# Altium footprint library FootPrintLib_9.PcbLib: 287 footprints (part 2 of 18)
Each footprint in its own frame and in the unit in brackets; x right, y up, seen from the top. Pads: shape width x height; smd on the part's side, far side on the other; paste and mask are expansions set on the pad; w line width, h text height; cw(c..) or ccw(c..) is an arc to the next point about the centre after c.
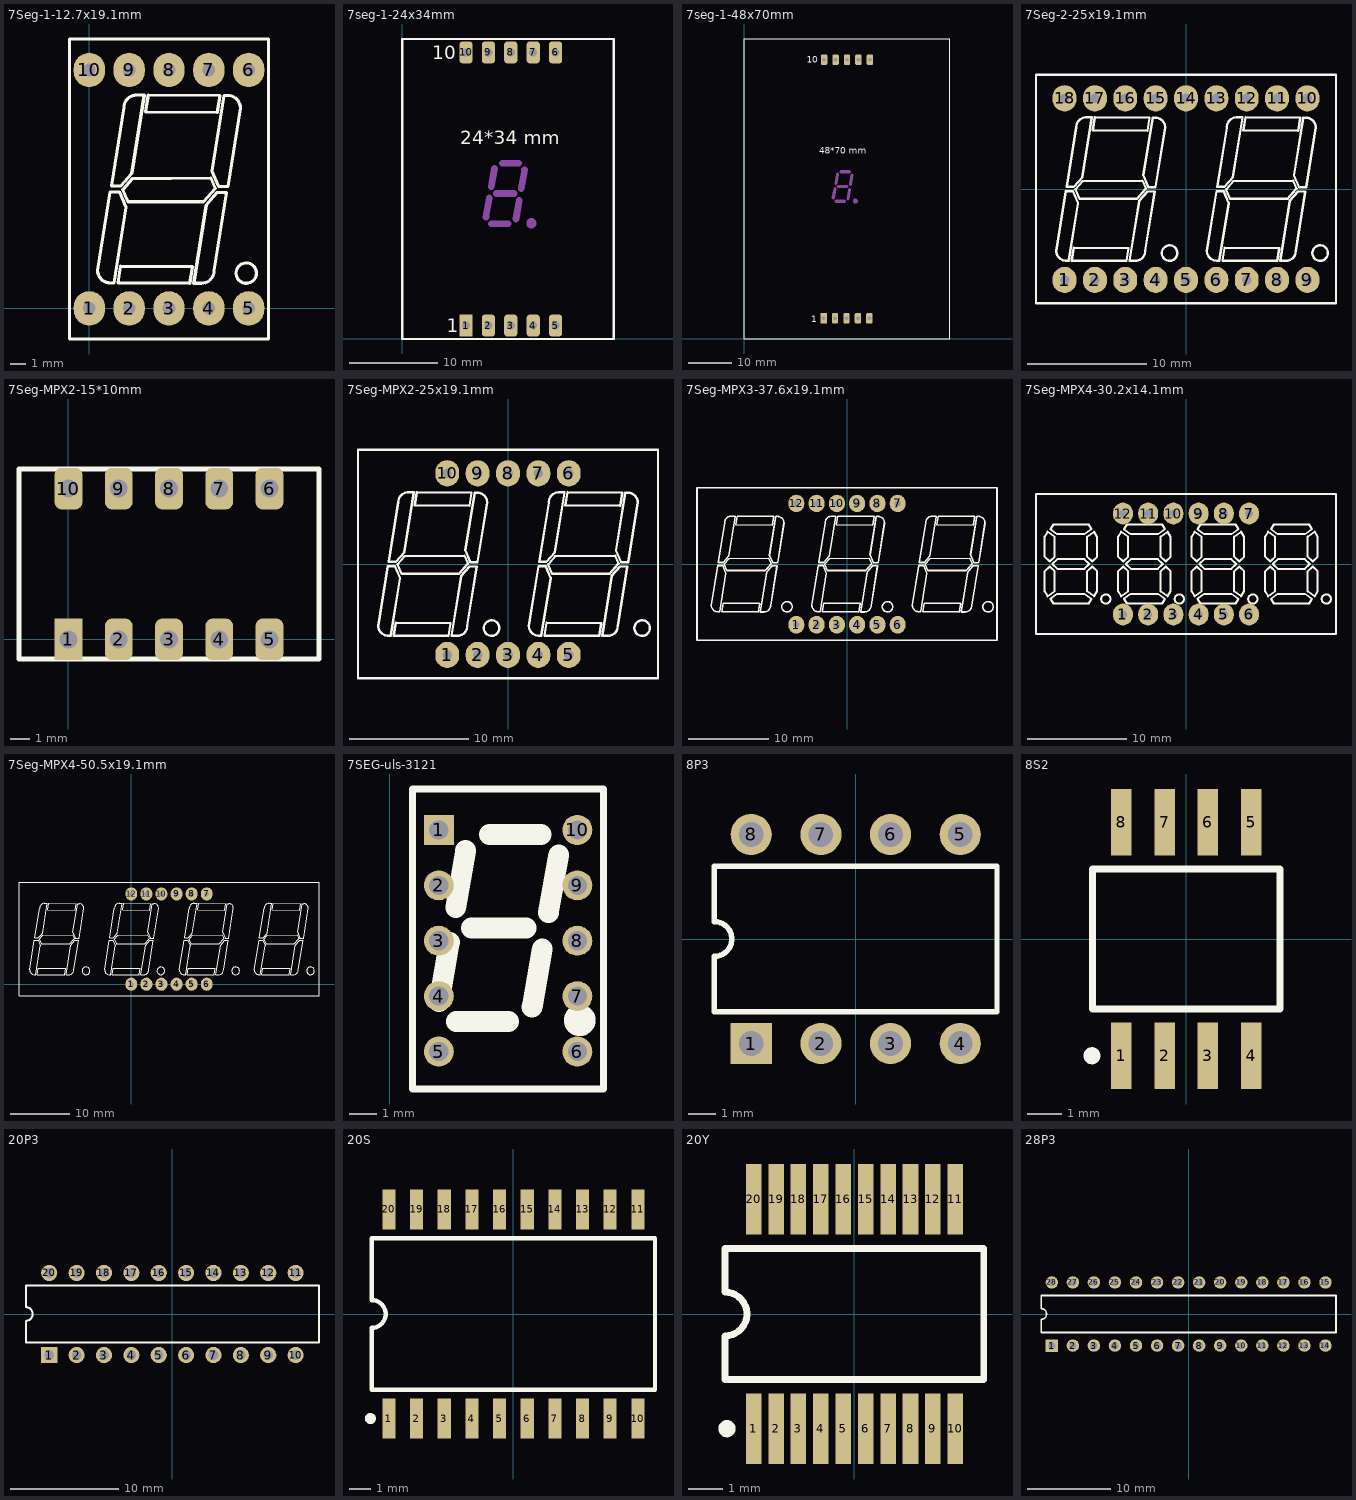
[diagram p1: the footprints below, top view; thin cyan lines are the x and y axes]

## 7Seg-1-12.7x19.1mm [mm] "7Seg Display; 10 Leads; Body 12/7x19/1mm"
height 8.3
pads (10):
  oval 2x2.2 hole 0.8: 1(0,0) 2(2.54,0) 3(5.08,0) 4(7.62,0) 5(10.16,0) 6(10.16,15.2) 7(7.62,15.2) 8(5.08,15.2) 9(2.54,15.2) 10(0,15.2)
Top Overlay:
  circle w0.2: c10.005,2.25 r0.65
  lines w0.2: -1.27,-1.95 11.43,-1.95 11.43,17.175 -1.27,17.175 -1.27,-1.95 ; 0.53,2.425 ccw(c1.33,2.425) 1.33,1.625 1.574,1.625 2.346,6.451 1.93,7.425 1.33,7.425 0.53,2.425 ; 1.405,7.8 2.005,7.8 2.705,8.6 3.505,13.6 3.005,13.6 ccw(c3.005,12.8) 2.205,12.8 1.405,7.8 ; 1.83,1.625 1.998,2.69 6.573,2.665 6.405,1.6 1.83,1.625 ; 2.13,7.575 2.155,7.6 2.732,8.266 7.741,8.317 8.03,7.65 7.28,6.8 2.465,6.8 2.13,7.575 ; 3.584,12.516 8.159,12.491 8.33,13.575 3.755,13.6 3.584,12.516 ; 6.655,1.6 7.155,1.6 ccw(c7.155,2.4) 7.955,2.4 8.755,7.4 8.155,7.4 7.455,6.6 6.655,1.6 ; 7.814,8.749 8.23,7.775 8.83,7.775 9.63,12.775 ccw(c8.83,12.775) 8.83,13.575 8.586,13.575 7.814,8.749
Mechanical 1:
  region: 8.95,13.3
  region: 8.95,-1.9
3D body "end-el-san Co Ltd-King Bright SA-SC56-11.STEP": height 8.1, standoff -3.9, extent -1.27,-1.95 11.43,17.1

## 7seg-1-24x34mm [mm] "7Seg Display; 10 Leads; Body 24x34mm"
height 34
pads (10):
  rect 1.5x2.5 hole 0.9: 1(7.239,1.524)
  rrect50% 1.5x2.5 hole 0.9: 2(9.779,1.524) 3(12.319,1.524) 4(14.859,1.524) 5(17.399,1.524) 6(17.399,32.512) 7(14.859,32.512) 8(12.319,32.512) 9(9.779,32.512) 10(7.239,32.512)
Top Overlay:
  lines w0.254: 0,34 0,0 24,0 ; 0,34.036 24.003,34.036 24.003,0
  text "1" at 5.08,0.762 h1.52
  text "10" at 3.429,31.75 h1.52
  text "24*34 mm" at 6.604,22.098 h1.52
Mechanical 1:
  circle w0.86: c14.654,13.13 r0.15
  lines w0.762: 9.494,13.82 9.874,15.99 ; 10.104,17.27 10.464,19.35 ; 10.124,13.08 12.044,13.08 ; 10.68,16.51 12.688,16.51 ; 11.344,19.94 13.234,19.94 ; 12.904,13.62 13.274,15.75 ; 13.504,17.07 13.884,19.2

## 7seg-1-48x70mm [mm] "7Seg Display; 10 Leads; Body 48x70mm"
height 70
pads (10):
  rect 1.5x2.5 hole 0.9: 1(18.542,4.826)
  rrect50% 1.5x2.5 hole 0.9: 2(21.209,4.826) 3(23.876,4.826) 4(26.543,4.826) 5(29.21,4.826) 6(29.337,65.151) 7(26.67,65.151) 8(24.003,65.151) 9(21.336,65.151) 10(18.669,65.151)
Top Overlay:
  lines w0.254: 0,0 0,69.977 48,69.977 48,0 0,0
  text "10" at 14.605,64.389 h1.52
  text "48*70 mm" at 17.526,43.18 h1.52
  text "1" at 15.621,3.937 h1.52
Mechanical 1:
  circle w0.86: c25.957,32.18 r0.15
  lines w0.762: 20.797,32.87 21.177,35.04 ; 21.407,36.32 21.767,38.4 ; 21.427,32.13 23.347,32.13 ; 21.983,35.56 23.991,35.56 ; 22.647,38.99 24.537,38.99 ; 24.207,32.67 24.577,34.8 ; 24.807,36.12 25.187,38.25

## 7Seg-2-25x19.1mm [mm] "7Seg Display, 18-Leads, Body 25x19/1mm"
height 8.3
pads (18):
  oval 2x2.2 hole 0.8: 1(-10.16,-7.6) 2(-7.62,-7.6) 3(-5.08,-7.6) 4(-2.54,-7.6) 5(0,-7.6) 6(2.54,-7.6) 7(5.08,-7.6) 8(7.62,-7.6) 9(10.16,-7.6) 10(10.16,7.6) 11(7.62,7.6) 12(5.08,7.6) 13(2.54,7.6) 14(0,7.6) 15(-2.54,7.6) 16(-5.08,7.6) 17(-7.62,7.6) 18(-10.16,7.6)
Top Overlay:
  circle w0.2: c-1.375,-5.35 r0.65
  circle w0.2: c11.225,-5.35 r0.65
  lines w0.2: -0.05,-9.55 12.55,-9.55 12.55,9.575 -0.05,9.575 ; 0.05,-9.55 -12.55,-9.55 -12.55,9.575 0.05,9.575 ; -10.85,-5.175 ccw(c-10.05,-5.175) -10.05,-5.975 -9.806,-5.975 -9.034,-1.149 -9.45,-0.175 -10.05,-0.175 -10.85,-5.175 ; -9.975,0.2 -9.375,0.2 -8.675,1 -7.875,6 -8.375,6 ccw(c-8.375,5.2) -9.175,5.2 -9.975,0.2 ; -9.55,-5.975 -9.382,-4.91 -4.807,-4.935 -4.975,-6 -9.55,-5.975 ; -9.25,-0.025 -9.225,0 -8.648,0.666 -3.639,0.717 -3.35,0.05 -4.1,-0.8 -8.915,-0.8 -9.25,-0.025 ; -7.796,4.916 -3.221,4.891 -3.05,5.975 -7.625,6 -7.796,4.916 ; -4.725,-6 -4.225,-6 ccw(c-4.225,-5.2) -3.425,-5.2 -2.625,-0.2 -3.225,-0.2 -3.925,-1 -4.725,-6 ; -3.566,1.149 -3.15,0.175 -2.55,0.175 -1.75,5.175 ccw(c-2.55,5.175) -2.55,5.975 -2.794,5.975 -3.566,1.149 ; 1.75,-5.175 ccw(c2.55,-5.175) 2.55,-5.975 2.794,-5.975 3.566,-1.149 3.15,-0.175 2.55,-0.175 1.75,-5.175 ; 2.625,0.2 3.225,0.2 3.925,1 4.725,6 4.225,6 ccw(c4.225,5.2) 3.425,5.2 2.625,0.2 ; 3.05,-5.975 3.218,-4.91 7.793,-4.935 7.625,-6 3.05,-5.975 ; 3.35,-0.025 3.375,0 3.952,0.666 8.961,0.717 9.25,0.05 8.5,-0.8 3.685,-0.8 3.35,-0.025 ; 4.804,4.916 9.379,4.891 9.55,5.975 4.975,6 4.804,4.916 ; 7.875,-6 8.375,-6 ccw(c8.375,-5.2) 9.175,-5.2 9.975,-0.2 9.375,-0.2 8.675,-1 7.875,-6 ; 9.034,1.149 9.45,0.175 10.05,0.175 10.85,5.175 ccw(c10.05,5.175) 10.05,5.975 9.806,5.975 9.034,1.149
Mechanical 1:
  region: -2.43,5.7
  region: 10.17,5.7
  region: 2.6,-9.5
3D body "end-el-san Co Ltd-King Bright DX56-11A.STEP": height 8.2, standoff -3.8, extent -12.5,-9.525 12.5,9.525

## 7Seg-MPX2-15*10mm [mm] "2 digit 7segment multiplexing"
height 6
pads (10):
  rect 1.4x2.1 hole 0.9: 1(0,0)
  rrect50% 1.4x2.1 hole 0.9: 2(2.54,0) 3(5.08,0) 4(7.62,0) 5(10.16,0) 6(10.16,7.62) 7(7.62,7.62) 8(5.08,7.62) 9(2.54,7.62) 10(0,7.62)
Top Overlay:
  lines w0.254: -2.5,-1 12.66,-1 12.66,8.6 -2.5,8.6 -2.5,-1

## 7Seg-MPX2-25x19.1mm [mm] "7Seg Display, 10-Leads, Body 25x19/1mm"
height 8.3
pads (10):
  oval 2x2.2 hole 0.8: 1(-5.08,-7.6) 2(-2.54,-7.6) 3(0,-7.6) 4(2.54,-7.6) 5(5.08,-7.6) 6(5.08,7.6) 7(2.54,7.6) 8(0,7.6) 9(-2.54,7.6) 10(-5.08,7.6)
Top Overlay:
  circle w0.2: c-1.375,-5.35 r0.65
  circle w0.2: c11.225,-5.35 r0.65
  lines w0.2: -0.05,-9.55 12.55,-9.55 12.55,9.575 -0.05,9.575 ; 0.05,-9.55 -12.55,-9.55 -12.55,9.575 0.05,9.575 ; -10.85,-5.175 ccw(c-10.05,-5.175) -10.05,-5.975 -9.806,-5.975 -9.034,-1.149 -9.45,-0.175 -10.05,-0.175 -10.85,-5.175 ; -9.975,0.2 -9.375,0.2 -8.675,1 -7.875,6 -8.375,6 ccw(c-8.375,5.2) -9.175,5.2 -9.975,0.2 ; -9.55,-5.975 -9.382,-4.91 -4.807,-4.935 -4.975,-6 -9.55,-5.975 ; -9.25,-0.025 -9.225,0 -8.648,0.666 -3.639,0.717 -3.35,0.05 -4.1,-0.8 -8.915,-0.8 -9.25,-0.025 ; -7.796,4.916 -3.221,4.891 -3.05,5.975 -7.625,6 -7.796,4.916 ; -4.725,-6 -4.225,-6 ccw(c-4.225,-5.2) -3.425,-5.2 -2.625,-0.2 -3.225,-0.2 -3.925,-1 -4.725,-6 ; -3.566,1.149 -3.15,0.175 -2.55,0.175 -1.75,5.175 ccw(c-2.55,5.175) -2.55,5.975 -2.794,5.975 -3.566,1.149 ; 1.75,-5.175 ccw(c2.55,-5.175) 2.55,-5.975 2.794,-5.975 3.566,-1.149 3.15,-0.175 2.55,-0.175 1.75,-5.175 ; 2.625,0.2 3.225,0.2 3.925,1 4.725,6 4.225,6 ccw(c4.225,5.2) 3.425,5.2 2.625,0.2 ; 3.05,-5.975 3.218,-4.91 7.793,-4.935 7.625,-6 3.05,-5.975 ; 3.35,-0.025 3.375,0 3.952,0.666 8.961,0.717 9.25,0.05 8.5,-0.8 3.685,-0.8 3.35,-0.025 ; 4.804,4.916 9.379,4.891 9.55,5.975 4.975,6 4.804,4.916 ; 7.875,-6 8.375,-6 ccw(c8.375,-5.2) 9.175,-5.2 9.975,-0.2 9.375,-0.2 8.675,-1 7.875,-6 ; 9.034,1.149 9.45,0.175 10.05,0.175 10.85,5.175 ccw(c10.05,5.175) 10.05,5.975 9.806,5.975 9.034,1.149
Mechanical 1:
  region: -2.43,5.7
  region: 10.17,5.7
  region: 2.6,-9.5
3D body "2 Digit Mux.step": height 8.3, standoff -2.2, extent -12.55,-9.55 12.55,9.55

## 7Seg-MPX3-37.6x19.1mm [mm] "Display, 12-Leads, Body 37/6x19/1mm"
height 8.3
pads (12):
  oval 2x2.2 hole 0.8: 1(-6.35,-7.6) 2(-3.81,-7.6) 3(-1.27,-7.6) 4(1.27,-7.6) 5(3.81,-7.6) 6(6.35,-7.6) 7(6.35,7.6) 8(3.81,7.6) 9(1.27,7.6) 10(-1.27,7.6) 11(-3.81,7.6) 12(-6.35,7.6)
Top Overlay:
  circle w0.2: c-7.525,-5.35 r0.65
  circle w0.2: c5.075,-5.35 r0.65
  circle w0.2: c17.675,-5.35 r0.65
  lines w0.2: -6.2,-9.55 6.5,-9.55 ; -6.2,9.575 6.5,9.575 ; -6.1,-9.55 -18.8,-9.55 -18.8,9.575 -6.1,9.575 ; 6.4,-9.55 18.8,-9.55 18.8,9.575 6.4,9.575 ; -17,-5.175 ccw(c-16.2,-5.175) -16.2,-5.975 -15.956,-5.975 -15.184,-1.149 -15.6,-0.175 -16.2,-0.175 -17,-5.175 ; -16.125,0.2 -15.325,5.2 cw(c-14.525,5.2) -14.525,6 -14.025,6 -14.825,1 -15.525,0.2 -16.125,0.2 ; -15.7,-5.975 -11.125,-6 -10.957,-4.935 -15.532,-4.91 -15.7,-5.975 ; -15.4,-0.025 -15.065,-0.8 -10.25,-0.8 -9.5,0.05 -9.789,0.717 -14.798,0.666 -15.375,0 -15.4,-0.025 ; -13.946,4.916 -13.775,6 -9.2,5.975 -9.371,4.891 -13.946,4.916 ; -10.875,-6 -10.075,-1 -9.375,-0.2 -8.775,-0.2 -9.575,-5.2 cw(c-10.375,-5.2) -10.375,-6 -10.875,-6 ; -9.716,1.149 -8.944,5.975 -8.7,5.975 cw(c-8.7,5.175) -7.9,5.175 -8.7,0.175 -9.3,0.175 -9.716,1.149 ; -4.4,-5.175 ccw(c-3.6,-5.175) -3.6,-5.975 -3.356,-5.975 -2.584,-1.149 -3,-0.175 -3.6,-0.175 -4.4,-5.175 ; -3.525,0.2 -2.925,0.2 -2.225,1 -1.425,6 -1.925,6 ccw(c-1.925,5.2) -2.725,5.2 -3.525,0.2 ; -3.1,-5.975 -2.932,-4.91 1.643,-4.935 1.475,-6 -3.1,-5.975 ; -2.8,-0.025 -2.775,0 -2.198,0.666 2.811,0.717 3.1,0.05 2.35,-0.8 -2.465,-0.8 -2.8,-0.025 ; -1.346,4.916 3.229,4.891 3.4,5.975 -1.175,6 -1.346,4.916 ; 1.725,-6 2.225,-6 ccw(c2.225,-5.2) 3.025,-5.2 3.825,-0.2 3.225,-0.2 2.525,-1 1.725,-6 ; 2.884,1.149 3.3,0.175 3.9,0.175 4.7,5.175 ccw(c3.9,5.175) 3.9,5.975 3.656,5.975 2.884,1.149 ; 8.2,-5.175 ccw(c9,-5.175) 9,-5.975 9.244,-5.975 10.016,-1.149 9.6,-0.175 9,-0.175 8.2,-5.175 ; 9.075,0.2 9.675,0.2 10.375,1 11.175,6 10.675,6 ccw(c10.675,5.2) 9.875,5.2 9.075,0.2 ; 9.5,-5.975 9.668,-4.91 14.243,-4.935 14.075,-6 9.5,-5.975 ; 9.8,-0.025 9.825,0 10.402,0.666 15.411,0.717 15.7,0.05 14.95,-0.8 10.135,-0.8 9.8,-0.025 ; 11.254,4.916 15.829,4.891 16,5.975 11.425,6 11.254,4.916 ; 14.325,-6 14.825,-6 ccw(c14.825,-5.2) 15.625,-5.2 16.425,-0.2 15.825,-0.2 15.125,-1 14.325,-6 ; 15.484,1.149 15.9,0.175 16.5,0.175 17.3,5.175 ccw(c16.5,5.175) 16.5,5.975 16.256,5.975 15.484,1.149
3D body "end-el-san Co Ltd-King Bright BX56-12A.STEP": height 8.2, standoff -3.9, extent -18.8,-9.5 18.8,9.5

## 7Seg-MPX4-30.2x14.1mm [mm] "Display, 12-Leads, Body 30/2x14/1mm"
height 7.3
pads (12):
  oval 2x2.2 hole 0.8: 1(-6.35,-5.08) 2(-3.81,-5.08) 3(-1.27,-5.08) 4(1.27,-5.08) 5(3.81,-5.08) 6(6.35,-5.08) 7(6.35,5.08) 8(3.81,5.08) 9(1.27,5.08) 10(-1.27,5.08) 11(-3.81,5.08) 12(-6.35,5.08)
Top Overlay:
  drawing of 176 lines, arcs and shapes, not listed
Mechanical 1:
  region: 2.6,-6.98
3D body "User Library-3641_w_o_color_jam.STEP": height 7.1, standoff -5.5, extent -15,-7 15,7

## 7Seg-MPX4-50.5x19.1mm [mm] "Display, 12-Leads, Body 50.5x19/1mm"
height 8.3
pads (12):
  oval 2x2.2 hole 0.8: 1(0,0) 2(2.54,0) 3(5.08,0) 4(7.62,0) 5(10.16,0) 6(12.7,0) 7(12.7,15.2) 8(10.16,15.2) 9(7.62,15.2) 10(5.08,15.2) 11(2.54,15.2) 12(0,15.2)
Top Overlay:
  drawing of 170 lines, arcs and shapes, not listed
3D body "User Library-C-564 (7 segment 4 digit LED display).STEP": height 8, standoff -6.2, extent -18.85,-1.9 31.55,17.1

## 7SEG-uls-3121 [mm]
pads (10):
  rect 1.1x1.1 hole 0.7: 1(1.8,10.9)
  round 1.1 hole 0.7: 2(1.8,8.868) 3(1.8,6.836) 4(1.8,4.804) 5(1.8,2.772) 6(6.88,2.772) 7(6.88,4.804) 8(6.88,6.836) 9(6.88,8.868) 10(6.88,10.9)
Top Overlay:
  circle w0.86: c6.97,3.92 r0.15
  lines w0.254: 0.838,1.4 7.838,1.4 7.838,12.4 0.838,12.4 0.838,1.4
  lines w0.762: 1.81,4.61 2.19,6.78 ; 2.42,8.06 2.78,10.14 ; 2.44,3.87 4.36,3.87 ; 2.996,7.3 5.004,7.3 ; 3.66,10.73 5.55,10.73 ; 5.22,4.41 5.59,6.54 ; 5.82,7.86 6.2,9.99

## 8P3 [mm] "DIP; 8 Leads; Row Spacing 7.62 mm; Pitch 2.54 mm"
height 5.33
pads (8):
  rect 1.5x1.5 hole 0.9: 1(-3.81,-3.81)
  round 1.5 hole 0.9: 2(-1.27,-3.81) 3(1.27,-3.81) 4(3.81,-3.81) 5(3.81,3.81) 6(1.27,3.81) 7(-1.27,3.81) 8(-3.81,3.81)
Top Overlay:
  lines w0.2: -5.15,-2.65 5.15,-2.65 5.15,2.65 -5.15,2.65 -5.15,0.635 cw(c-5.15,0) -5.15,-0.635 -5.15,-2.65

## 8S2 [mm] "Small Outline; 8 Leads; Body Width 5.3 mm; Pitch 1.27 mm"
height 2.03
pads (8):
  rect 0.6x1.95 smd: 1(-1.905,-3.425) 2(-0.635,-3.425) 3(0.635,-3.425) 4(1.905,-3.425) 5(1.905,3.425) 6(0.635,3.425) 7(-0.635,3.425) 8(-1.905,3.425)
Top Overlay:
  circle w0.25: c-2.765,-3.425 r0.125
  lines w0.2: -2.75,-2.05 -2.75,-0.683 -2.75,2.05 2.75,2.05 2.75,-2.05 -2.75,-2.05

## 20P3 [mm] "DIP; 20 Leads; Row Spacing 7.62 mm; Pitch 2.54 mm"
height 5.33
pads (20):
  rect 1.5x1.5 hole 0.9: 1(-11.43,-3.81)
  round 1.5 hole 0.9: 2(-8.89,-3.81) 3(-6.35,-3.81) 4(-3.81,-3.81) 5(-1.27,-3.81) 6(1.27,-3.81) 7(3.81,-3.81) 8(6.35,-3.81) 9(8.89,-3.81) 10(11.43,-3.81) 11(11.43,3.81) 12(8.89,3.81) 13(6.35,3.81) 14(3.81,3.81) 15(1.27,3.81) 16(-1.27,3.81) 17(-3.81,3.81) 18(-6.35,3.81) 19(-8.89,3.81) 20(-11.43,3.81)
Top Overlay:
  lines w0.2: -13.6,-2.65 13.6,-2.65 13.6,2.65 -13.6,2.65 -13.6,0.635 cw(c-13.6,0) -13.6,-0.635 -13.6,-2.65

## 20S [mm] "Small Outline; 20 Leads; Body Width 7.5 mm; Pitch 1.27 mm"
height 2.67
pads (20):
  rect 0.6x1.85 smd: 1(-5.715,-4.8) 2(-4.445,-4.8) 3(-3.175,-4.8) 4(-1.905,-4.8) 5(-0.635,-4.8) 6(0.635,-4.8) 7(1.905,-4.8) 8(3.175,-4.8) 9(4.445,-4.8) 10(5.715,-4.8) 11(5.715,4.8) 12(4.445,4.8) 13(3.175,4.8) 14(1.905,4.8) 15(0.635,4.8) 16(-0.635,4.8) 17(-1.905,4.8) 18(-3.175,4.8) 19(-4.445,4.8) 20(-5.715,4.8)
Top Overlay:
  circle w0.25: c-6.565,-4.8 r0.125
  lines w0.2: -6.5,-3.475 6.5,-3.475 6.5,3.475 -6.5,3.475 -6.5,0.635 cw(c-6.5,0) -6.5,-0.635 -6.5,-3.475

## 20Y [mm] "SSOP; 20 Leads; Body Width 5.3 mm; Pitch 0.65 mm"
height 1.99
pads (20):
  rect 0.45x2.05 smd: 1(-2.925,-3.325) 2(-2.275,-3.325) 3(-1.625,-3.325) 4(-0.975,-3.325) 5(-0.325,-3.325) 6(0.325,-3.325) 7(0.975,-3.325) 8(1.625,-3.325) 9(2.275,-3.325) 10(2.925,-3.325) 11(2.925,3.325) 12(2.275,3.325) 13(1.625,3.325) 14(0.975,3.325) 15(0.325,3.325) 16(-0.325,3.325) 17(-0.975,3.325) 18(-1.625,3.325) 19(-2.275,3.325) 20(-2.925,3.325)
Top Overlay:
  circle w0.25: c-3.7,-3.325 r0.125
  lines w0.2: -3.75,-1.9 3.75,-1.9 3.75,1.9 -3.75,1.9 -3.75,0.633 cw(c-3.75,0) -3.75,-0.633 -3.75,-1.9

## 28P3 [mm] "DIP; 28 Leads; Row Spacing 7.62 mm; Pitch 2.54 mm"
height 4.58
pads (28):
  rect 1.5x1.5 hole 0.9: 1(-16.51,-3.81)
  round 1.5 hole 0.9: 2(-13.97,-3.81) 3(-11.43,-3.81) 4(-8.89,-3.81) 5(-6.35,-3.81) 6(-3.81,-3.81) 7(-1.27,-3.81) 8(1.27,-3.81) 9(3.81,-3.81) 10(6.35,-3.81) 11(8.89,-3.81) 12(11.43,-3.81) 13(13.97,-3.81) 14(16.51,-3.81) 15(16.51,3.81) 16(13.97,3.81) 17(11.43,3.81) 18(8.89,3.81) 19(6.35,3.81) 20(3.81,3.81) 21(1.27,3.81) 22(-1.27,3.81) 23(-3.81,3.81) 24(-6.35,3.81) 25(-8.89,3.81) 26(-11.43,3.81) 27(-13.97,3.81) 28(-16.51,3.81)
Top Overlay:
  lines w0.2: -17.78,-2.225 -17.78,-0.635 ccw(c-17.78,0) -17.78,0.635 -17.78,2.225 17.78,2.225 17.78,-2.225 -17.78,-2.225